# Altium footprint library LiPo_Charger.PcbLib: 8 footprints
Each footprint in its own frame and in the unit in brackets; x right, y up, seen from the top. Pads: shape width x height; smd on the part's side, far side on the other; paste and mask are expansions set on the pad; w line width, h text height; cw(c..) or ccw(c..) is an arc to the next point about the centre after c.
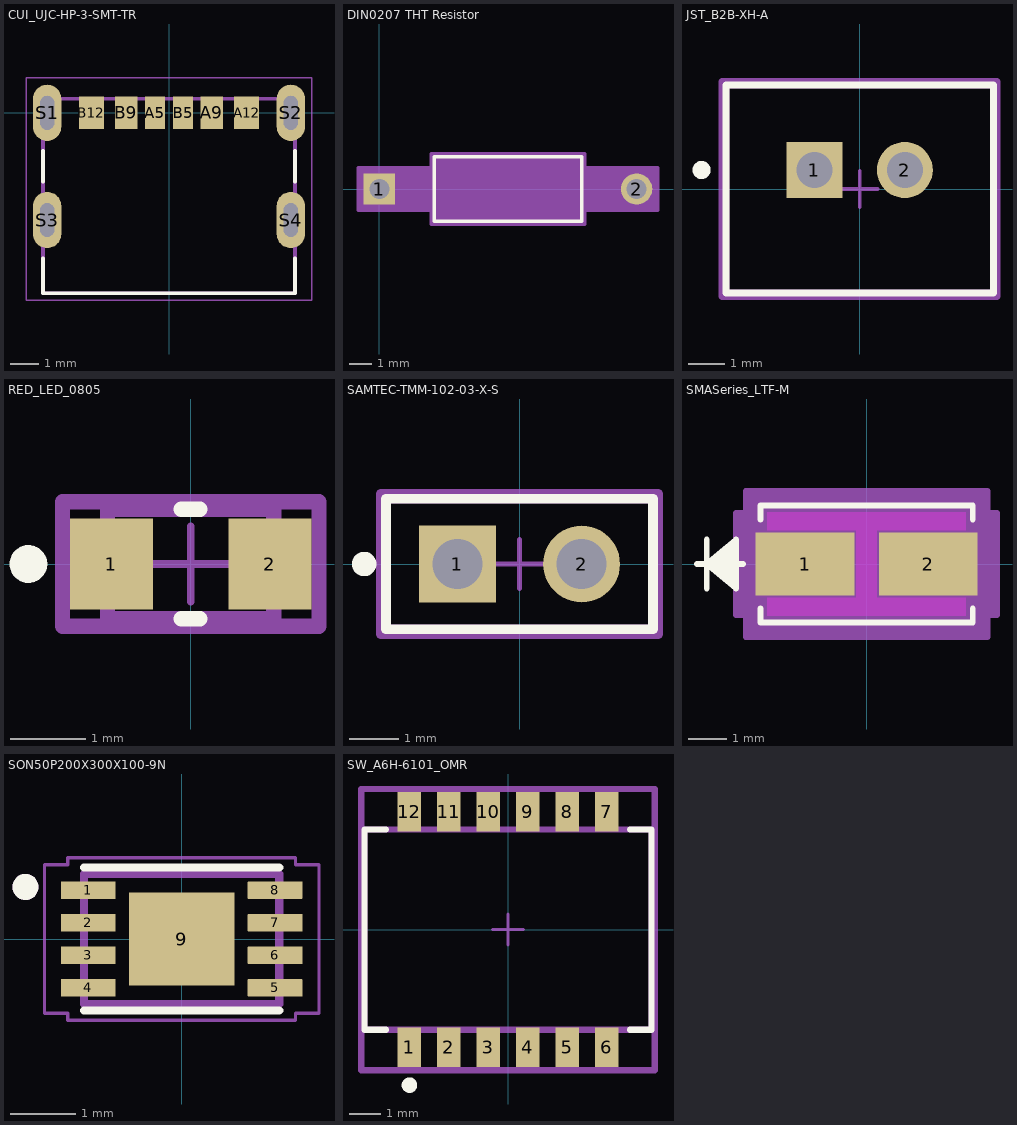
[diagram p0: the footprints below, top view; thin cyan lines are the x and y axes]

## CUI_UJC-HP-3-SMT-TR [mm]
height 3.16
pads (10):
  rect 0.7x1.15 smd: A5(-0.5,0.005) B5(0.5,0.005)
  rect 0.8x1.15 smd: A9(1.52,0.005) B9(-1.52,0.005)
  rect 0.9x1.15 smd: A12(2.75,0.005) B12(-2.75,0.005)
  oval 1x2 hole 0.5 slot 1.2 at 90 deg: S1(-4.32,0) S2(4.32,0) S3(-4.32,-3.8) S4(4.32,-3.8)
Top Overlay:
  lines w0.127: -4.47,-5.15 -4.47,-6.4 4.47,-6.4 4.47,-5.15 ; -4.47,-2.45 -4.47,-1.35 ; 4.47,-2.45 4.47,-1.35
Mechanical 13:
  lines w0.127: -4.47,-6.4 4.47,-6.4 4.47,0.5 -4.47,0.5 -4.47,-6.4
Mechanical 15:
  lines w0.05: -5.07,-6.65 5.07,-6.65 5.07,1.25 -5.07,1.25 -5.07,-6.65
3D body "step_temp.STEP": height 1.93, standoff -2.33, extent -4.47,-6.35 4.47,0.55

## DIN0207 THT Resistor [mil]
pads (2):
  rect 55x55 hole 35 paste-99999 mask+0: 1(0,0)
  round 55 hole 35 paste-99999 mask+0: 2(450,0)
Top Overlay:
  lines w6: 96,-56.5 96,56.5 354,56.5 354,-56.5 96,-56.5
Mechanical 13:
  lines w1: 0,0 101,0 ; 349,0 450,0 ; 101,-51.5 101,51.5 349,51.5 349,-51.5 101,-51.5
Mechanical 15:
  region: 91,-37.5 -37.5,-37.5 -37.5,37.5 91,37.5 91,61.5 359,61.5 359,37.5 487.5,37.5 487.5,-37.5 359,-37.5 359,-61.5 91,-61.5
  lines w6: -37.5,-37.5 91,-37.5 91,-61.5 359,-61.5 359,-37.5 487.5,-37.5 487.5,37.5 359,37.5 359,61.5 91,61.5 91,37.5 -37.5,37.5 -37.5,-37.5
3D body "STA_CF14_STP.step": height 103, standoff -110, extent -12.48,-51.12 462.48,51.12

## JST_B2B-XH-A [mm]
height 7
pads (2):
  rect 1.55x1.55 hole 1 paste-2539.97 mask+0: 1(-1.25,0.525)
  round 1.55 hole 1 paste-2539.97 mask+0: 2(1.25,0.525)
Top Overlay:
  circle w0.25: c-4.375,0.525 r0.125
  lines w0.2: -3.7,-2.875 3.7,-2.875 3.7,2.875 -3.7,2.875 -3.7,-2.875
Top 3D Body:
  lines w0.2: -3.7,-2.875 3.7,-2.875 3.7,2.875 -3.7,2.875 -3.7,-2.875
Board:
  lines w0.2: -3.8,-2.975 3.8,-2.975 3.8,2.975 -3.8,2.975 -3.8,-2.975
Top Assembly:
  lines w0.2: -3.8,-2.975 3.8,-2.975 3.8,2.975 -3.8,2.975 -3.8,-2.975
Top Component Center:
  lines w0.1: -0.5,0 0.5,0 ; 0,-0.5 0,0.5
3D body "Conn_JST_B2B-XH-A_LF_SN_eec.STEP": height 0.25, standoff 0, extent -3.8,-2.975 3.8,2.975

## RED_LED_0805 [mm]
pads (2):
  rect 1.1x1.2 smd paste+0 mask+0.05: 1(-1.05,0) 2(1.05,0)
Top Overlay:
  circle w0.25: c-2.15,0 r0.125
  lines w0.2: -0.125,-0.725 0.125,-0.725 ; -0.125,0.725 0.125,0.725
Top 3D Body:
  lines w0.2: -1.1,-0.725 1.1,-0.725 1.1,0.725 -1.1,0.725 -1.1,-0.725
Top Courtyard:
  lines w0.2: -1.7,-0.825 1.7,-0.825 1.7,0.825 -1.7,0.825 -1.7,-0.825
Top Assembly:
  lines w0.2: -1.7,-0.825 1.7,-0.825 1.7,0.825 -1.7,0.825 -1.7,-0.825
Top Component Center:
  lines w0.1: -0.5,0 0.5,0 ; 0,-0.5 0,0.5
3D body "Diode_Dialight_5988110107F_eec.STEP": height 0.25, standoff 0, extent -1.7,-0.825 1.7,0.825

## SAMTEC-TMM-102-03-X-S [mm]
pads (2):
  rect 1.57x1.57 hole 1.02 paste-2539.97 mask+0: 1(-1.27,0)
  round 1.57 hole 1.02 paste-2539.97 mask+0: 2(1.27,0)
Top Overlay:
  circle w0.25: c-3.175,0 r0.125
  lines w0.2: -2.73,-1.335 -2.73,1.335 2.73,1.335 2.73,-1.335 -2.73,-1.335
Top 3D Body:
  lines w0.2: -2.73,-1.335 -2.73,1.335 2.73,1.335 2.73,-1.335 -2.73,-1.335
Top Courtyard:
  lines w0.2: -2.83,-1.435 -2.83,1.435 2.83,1.435 2.83,-1.435 -2.83,-1.435
Top Assembly:
  lines w0.2: -2.83,-1.435 -2.83,1.435 2.83,1.435 2.83,-1.435 -2.83,-1.435
Top Component Center:
  lines w0.1: -0.5,0 0.5,0 ; 0,-0.5 0,0.5
3D body "Conn_Samtec_TSW-102-07-F-S_eec.STEP": height 0.25, standoff 0, extent -2.83,-1.435 2.83,1.435

## SMASeries_LTF-M [mil]
pads (2):
  rect 101.34x65 smd paste+0 mask+0: 1(-63.17,0) 2(63.17,0)
Top Layer keep-out:
  region: -102,-53 -102,-34.5 102,-34.5 102,-53
  region: -102,34.5 -102,53 102,53 102,34.5
  region: -10.5,-34.5 -10.5,34.5 10.5,34.5 10.5,-34.5
Top Overlay:
  lines w6: -174,0 -126.94,0 ; -164,-25 -164,25 ; -134,-20 -164,0 ; -134,-15 -164,0 ; -134,-10 -164,0 ; -134,-5 -164,0 ; -134,5 -164,0 ; -134,10 -164,0 ; -134,15 -164,0 ; -134,20 -164,0 ; -109,-45.6 -109,-60 109,-60 109,-45.6 ; -109,45.6 -109,60 109,60 109,45.6 ; -164,0 -134,-25 -134,25 -164,0
Keep-Out Layer:
  region: -10.5,-34.5 -10.5,34.5 10.5,34.5 10.5,-34.5
Mechanical 13:
  lines w1: -174,0 -124,0 ; -164,-25 -164,25 ; -134,-20 -164,0 ; -134,-15 -164,0 ; -134,-10 -164,0 ; -134,-5 -164,0 ; -134,5 -164,0 ; -134,10 -164,0 ; -134,15 -164,0 ; -134,20 -164,0 ; -164,0 -134,-25 -134,25 -164,0 ; -104,-55 -104,55 104,55 104,-55 -104,-55
Mechanical 15:
  region: -124,-52.5 -133.84,-52.5 -133.84,52.5 -124,52.5 -124,75 124,75 124,52.5 133.84,52.5 133.84,-52.5 124,-52.5 124,-75 -124,-75
  lines w6: -133.84,-52.5 -124,-52.5 -124,-75 124,-75 124,-52.5 133.84,-52.5 133.84,52.5 124,52.5 124,75 -124,75 -124,52.5 -133.84,52.5 -133.84,-52.5
3D body "SMASeries_LTF.step": height 92.01, standoff 0, extent -104.02,-55 104.02,55

## SON50P200X300X100-9N [mm]
pads (9):
  rrect7% 0.84x0.27 smd mask+0.05: 1(-1.435,0.75) 2(-1.435,0.25) 3(-1.435,-0.25) 4(-1.435,-0.75) 5(1.435,-0.75) 6(1.435,-0.25) 7(1.435,0.25) 8(1.435,0.75)
  rect 1.625x1.425 smd paste-2 mask+0.05: 9(0,0)
Top Overlay:
  circle w0.2: c-2.4,0.8 r0.1
  lines w0.127: -1.5,-1.099 1.5,-1.099 ; -1.5,1.099 1.5,1.099
Top Paste:
  region: 0.665,-0.49 0.075,-0.49 0.075,0.49 0.665,0.49
  region: -0.075,-0.49 -0.665,-0.49 -0.665,0.49 -0.075,0.49
Mechanical 13:
  circle w0.2: c-2.4,0.8 r0.1
  lines w0.127: -1.5,-1 1.5,-1 1.5,1 -1.5,1 -1.5,-1
Mechanical 15:
  lines w0.05: -2.11,-1.14 -2.11,1.14 -1.75,1.14 -1.75,1.25 1.75,1.25 1.75,1.14 2.11,1.14 2.11,-1.14 1.75,-1.14 1.75,-1.25 -1.75,-1.25 -1.75,-1.14 -2.11,-1.14
3D body "step_temp.STEP": height 1, standoff 0, extent -1.5,-1 1.5,1

## SW_A6H-6101_OMR [mm]
pads (12):
  rect 0.76x1.27 smd paste+0 mask+0: 1(-3.175,-3.795) 2(-1.905,-3.795) 3(-0.635,-3.795) 4(0.635,-3.795) 5(1.905,-3.795) 6(3.175,-3.795) 7(3.175,3.795) 8(1.905,3.795) 9(0.635,3.795) 10(-0.635,3.795) 11(-1.905,3.795) 12(-3.175,3.795)
Top Overlay:
  circle w0.25: c-3.175,-5.01 r0.125
  lines w0.2: -3.93,-3.225 -4.625,-3.225 -4.625,3.225 -3.93,3.225 ; 3.93,-3.225 4.625,-3.225 4.625,3.225 3.93,3.225
Top 3D Body:
  lines w0.2: -4.625,-3.225 -4.625,3.225 4.625,3.225 4.625,-3.225 -4.625,-3.225
Board:
  lines w0.2: -4.725,-4.53 -4.725,4.53 4.725,4.53 4.725,-4.53 -4.725,-4.53
Top Assembly:
  lines w0.2: -4.725,-4.53 -4.725,4.53 4.725,4.53 4.725,-4.53 -4.725,-4.53
Top Component Center:
  lines w0.1: -0.5,0 0.5,0 ; 0,-0.5 0,0.5
3D body "Switch_TE_Connectivity_1571983-9_eec.STEP": height 0.25, standoff 0, extent -4.725,-4.53 4.725,4.53